# Altium footprint library Package_DFN_QFN.PcbLib: 1 footprints
Each footprint in its own frame and in the unit in brackets; x right, y up, seen from the top. Pads: shape width x height; smd on the part's side, far side on the other; paste and mask are expansions set on the pad; w line width, h text height; cw(c..) or ccw(c..) is an arc to the next point about the centre after c.
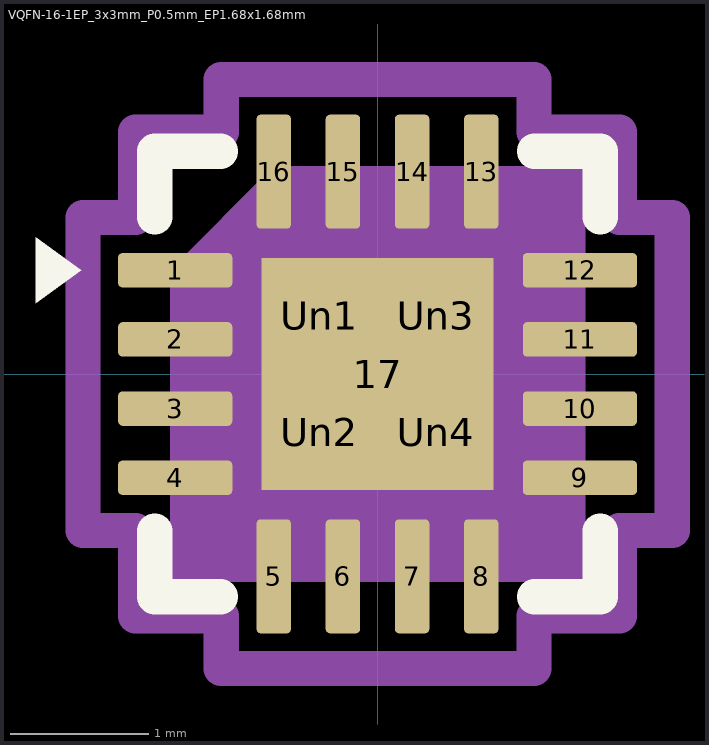
[diagram p0: the footprint, top view; thin cyan lines are the x and y axes]

## VQFN-16-1EP_3x3mm_P0.5mm_EP1.68x1.68mm [mm]
pads (21):
  rrect25% 0.825x0.25 smd: 1(-1.462,0.75) 2(-1.462,0.25) 3(-1.462,-0.25) 4(-1.462,-0.75) 9(1.462,-0.75) 10(1.462,-0.25) 11(1.462,0.25) 12(1.462,0.75)
  rrect25% 0.25x0.825 smd: 5(-0.75,-1.462) 6(-0.25,-1.462) 7(0.25,-1.462) 8(0.75,-1.462) 13(0.75,1.462) 14(0.25,1.462) 15(-0.25,1.462) 16(-0.75,1.462)
  rect 1.68x1.68 smd: 17(0,0)
  rrect25% 0.68x0.68 on Top Paste: Un1(-0.42,0.42) Un2(-0.42,-0.42) Un3(0.42,0.42) Un4(0.42,-0.42)
F.SilkS:
  region: -2.14,0.75 -2.47,0.51 -2.47,0.99
  lines w0.254: -1.61,-1.135 -1.61,-1.61 -1.135,-1.61 ; -1.61,1.135 -1.61,1.61 -1.135,1.61 ; 1.135,-1.61 1.61,-1.61 1.61,-1.135 ; 1.135,1.61 1.61,1.61 1.61,1.135
F.CrtYd:
  lines w0.254: -2.13,-1.13 -2.13,1.13 -1.75,1.13 -1.75,1.75 -1.13,1.75 -1.13,2.13 1.13,2.13 1.13,1.75 1.75,1.75 1.75,1.13 2.13,1.13 2.13,-1.13 1.75,-1.13 1.75,-1.75 1.13,-1.75 1.13,-2.13 -1.13,-2.13 -1.13,-1.75 -1.75,-1.75 -1.75,-1.13 -2.13,-1.13
F.Fab:
  region: 1.5,-1.5 -1.5,-1.5 -1.5,0.75 -0.75,1.5 1.5,1.5
  text "'.Designator'" at -3.033,-0.628 h0.75